# Altium schematic symbol library 0.22 µF, 25 V, X7R, 0603.SchLib: 1 symbol
Pins are listed as number, name and electrical type; pins without a type are passive.

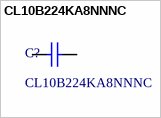
[diagram p0: symbol CL10B224KA8NNNC]

## CL10B224KA8NNNC
designator C?
0.22 µF, 25 V, X7R, 0603; Supplier 1: Future Electronics; Supplier Part Number 1: CL10B224KA8NNNC; JLCPCB Part #: C21120
footprint C_0603_1608Metric (Chip Ceramic Capacitor, 2-Leads, Body 1.60x0.80mm, IPC Medium Density, Samsung 0603 Reference)
pins: 1, 2